# Altium schematic symbol library DESD2CAN2SOQ-7.SchLib: 1 symbol
Pins are listed as number, name and electrical type; pins without a type are passive.

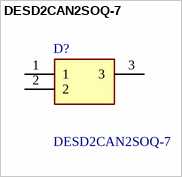
[diagram p0: symbol DESD2CAN2SOQ-7]

## DESD2CAN2SOQ-7
designator D?
DIODES INC. - DESD2CAN2SOQ-7 - ESD Protection Device, 41 V, SOT-23, 3 Pins, 300 mW; Manufacturer_Name: Diodes Incorporated; Geometry.Height: 1.1mm; Mouser Part Number: 621-DESD2CAN2SOQ-7; Mouser Price/Stock: https://www.mouser.co.uk/ProductDetail/Diodes-Incorporated/DESD2CAN2SOQ-7?qs=jXf%2FRVhl83a30%2FIU4KgEDg%3D%3D; Manufacturer_Part_Number: DESD2CAN2SOQ-7; Datasheet Link: *
footprint SOT96P240X110-3N
pins: 1, 2, 3